# Altium footprint library AudioMoth 1.1.PCBLIB: 193 footprints (part 11 of 13)
Each footprint in its own frame and in the unit in brackets; x right, y up, seen from the top. Pads: shape width x height; smd on the part's side, far side on the other; paste and mask are expansions set on the pad; w line width, h text height; cw(c..) or ccw(c..) is an arc to the next point about the centre after c.
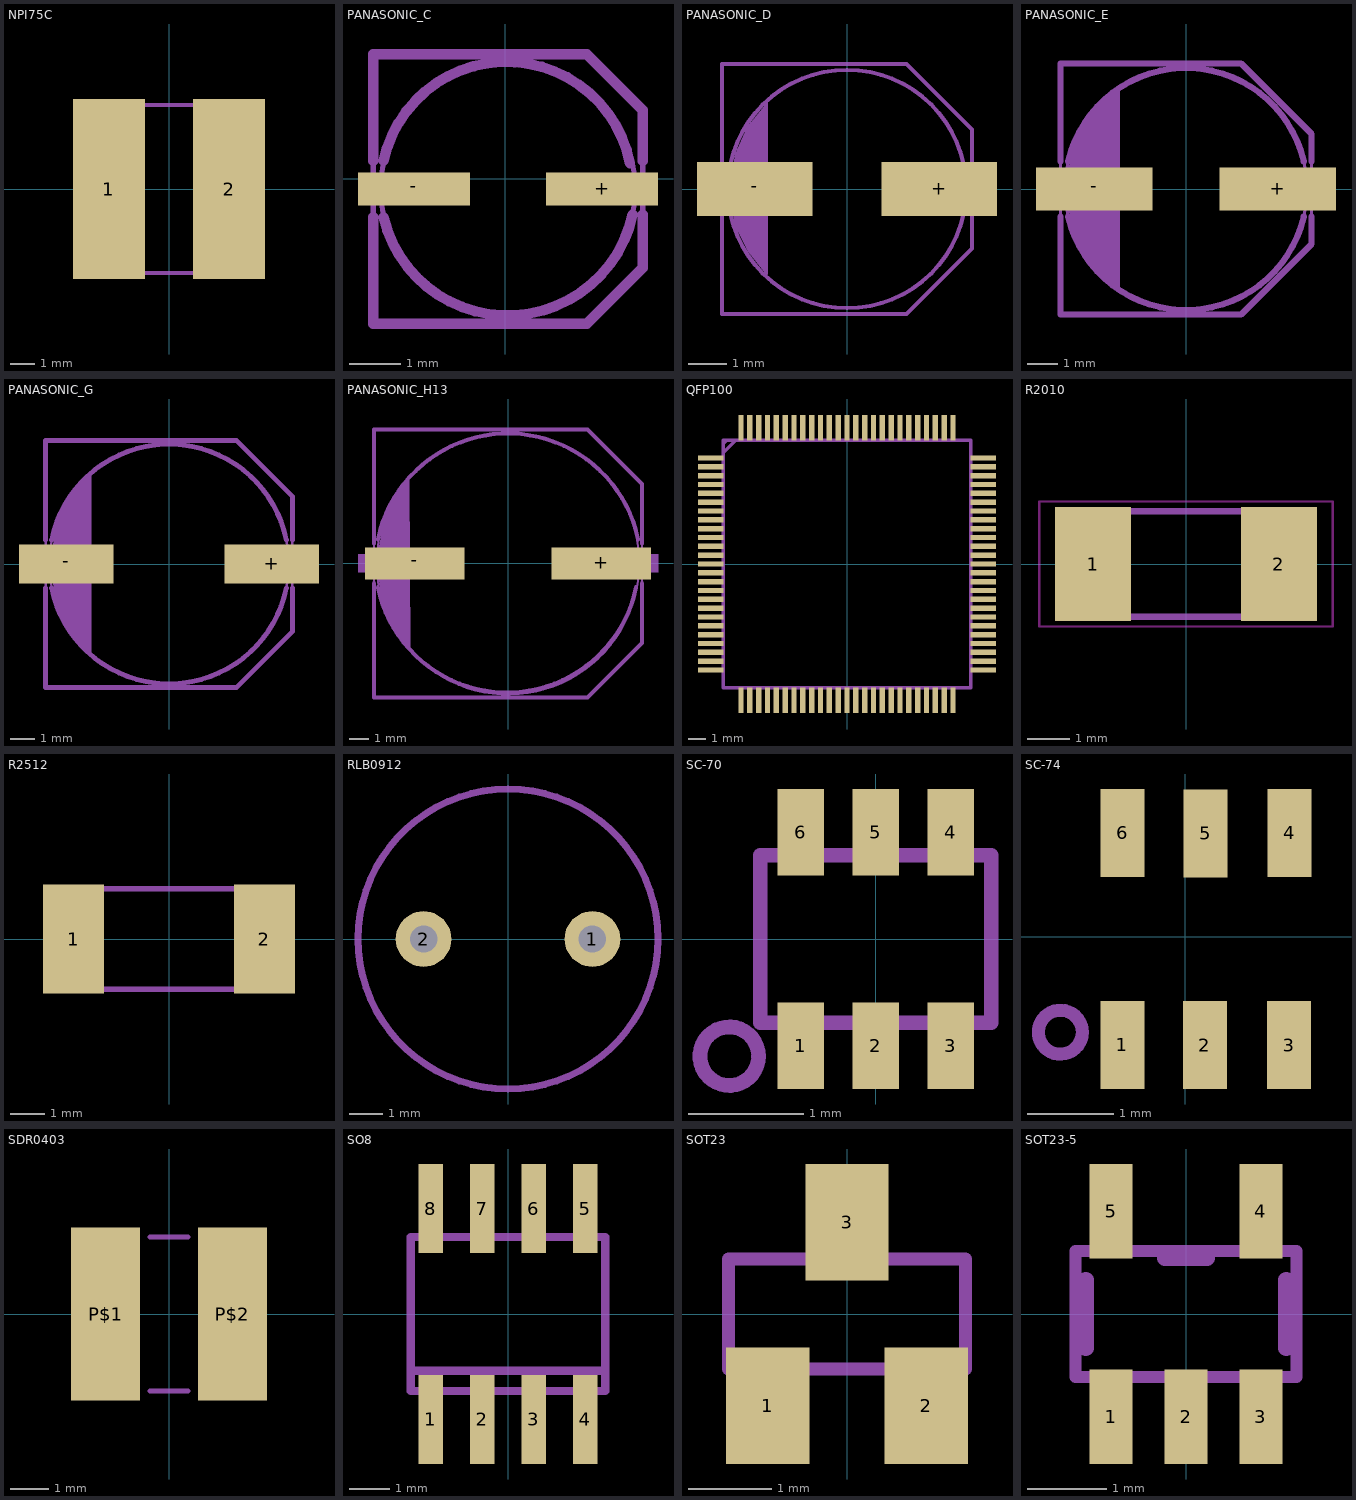
[diagram p10: the footprints below, top view; thin cyan lines are the x and y axes]

## NPI75C [mm]
pads (2):
  rect 3x7.5 smd: 1(-2.5,0) 2(2.5,0)
tDocu:
  lines w0.178: -3.9,-3.5 -3.9,3.5 3.9,3.5 3.9,-3.5 -3.9,-3.5
tPlace:
  lines w0.178: -0.8,-3.5 0.8,-3.5 ; -0.8,3.5 0.8,3.5

## PANASONIC_C [mm]
pads (2):
  rect 2.2x0.65 smd: +(1.9,-0.2) -(-1.8,-0.2)
tDocu:
  circle w0.102: c0.05,-0.2 r2.5
  lines w0.102: -2.6,-2.85 1.6,-2.85 2.7,-1.75 2.7,1.35 1.6,2.45 -2.6,2.45 -2.6,-2.85
tPlace:
  lines w0.203: -2.6,-0.75 -2.6,-2.85 1.6,-2.85 2.7,-1.75 2.7,-0.7 ; -2.6,0.35 -2.6,2.45 1.6,2.45 2.7,1.35 2.7,0.35 ; -2.4,-0.75 ccw(c0.044,-0.175) 2.5,-0.7 ; -2.4,0.35 cw(c0.02,-0.175) 2.45,0.3

## PANASONIC_D [mm]
pads (2):
  rect 3x1.4 smd: +(2.4,0) -(-2.4,0)
tDocu:
  circle w0.102: c0,0 r3.1
  region: -3.65,-0.35 -3.65,0.35 -3.05,0.35 -3.05,-0.35
  region: 3.05,-0.35 3.05,0.35 3.65,0.35 3.65,-0.35
  region: -2.15,2.15 -2.6,1.6 -2.9,0.9 -3.05,0 -2.9,-0.95 -2.55,-1.65 -2.15,-2.15 -2.15,2.1
  lines w0.102: -2.1,-2.2 -2.1,2.25 ; -3.25,-3.25 1.55,-3.25 3.25,-1.55 3.25,1.55 1.55,3.25 -3.25,3.25 -3.25,-3.25
tPlace:
  lines w0.102: -3.25,-0.95 -3.25,-3.25 1.55,-3.25 3.25,-1.55 3.25,-0.95 ; -3.25,0.95 -3.25,3.25 1.55,3.25 3.25,1.55 3.25,0.95 ; -2.95,-0.95 ccw(c0,0) 2.95,-0.95 ; -2.95,0.95 cw(c0,0) 2.95,0.95

## PANASONIC_E [mm]
pads (2):
  rect 3.8x1.4 smd: +(3,0) -(-3,0)
tDocu:
  circle w0.102: c0,0 r3.95
  region: -4.5,-0.35 -4.5,0.35 -3.8,0.35 -3.8,-0.35
  region: 3.8,-0.35 3.8,0.35 4.5,0.35 4.5,-0.35
  region: -2.25,3.2 -3,2.5 -3.6,1.5 -3.85,0.65 -3.85,-0.65 -3.55,-1.6 -2.95,-2.55 -2.25,-3.2 -2.25,3.15
  lines w0.102: -2.2,-3.25 -2.2,3.25 ; -4.1,-4.1 1.8,-4.1 4.1,-1.8 4.1,1.8 1.8,4.1 -4.1,4.1 -4.1,-4.1
tPlace:
  lines w0.203: -4.1,-0.9 -4.1,-4.1 1.8,-4.1 4.1,-1.8 4.1,-0.9 ; -4.1,0.9 -4.1,4.1 1.8,4.1 4.1,1.8 4.1,0.9 ; -3.85,-0.9 ccw(c0,0) 3.85,-0.9 ; -3.85,0.9 cw(c0,0) 3.85,0.9

## PANASONIC_G [mm]
pads (2):
  rect 3.9x1.6 smd: +(4.25,0) -(-4.25,0)
tDocu:
  circle w0.102: c0,0 r4.95
  region: -5.85,-0.45 -5.85,0.45 -4.9,0.45 -4.9,-0.45
  region: 4.9,-0.45 4.9,0.45 5.85,0.45 5.85,-0.45
  region: -3.3,3.6 -4.05,2.75 -4.65,1.55 -4.85,0.45 -4.85,-0.45 -4.65,-1.55 -4.05,-2.75 -3.3,-3.6 -3.3,3.55
  lines w0.102: -3.25,-3.65 -3.25,3.7 ; -5.1,-5.1 2.8,-5.1 5.1,-2.8 5.1,2.8 2.8,5.1 -5.1,5.1 -5.1,-5.1
tPlace:
  lines w0.203: -5.1,-1 -5.1,-5.1 2.8,-5.1 5.1,-2.8 5.1,-1 ; -5.1,1 -5.1,5.1 2.8,5.1 5.1,2.8 5.1,1 ; -4.85,-1 ccw(c0,0) 4.85,-1 ; -4.85,1 cw(c0,0) 4.85,1

## PANASONIC_H13 [mm]
pads (2):
  rect 5x1.6 smd: +(4.7,0) -(-4.7,0)
tDocu:
  circle w0.102: c0,0 r6.6
  region: -7.55,-0.45 -7.55,0.45 -6.6,0.45 -6.6,-0.45
  region: 6.6,-0.45 6.6,0.45 7.55,0.45 7.55,-0.45
  region: -5,4.2 -5.75,3.15 -6.25,2.05 -6.55,0.45 -6.55,-0.45 -6.35,-1.65 -5.75,-3.25 -5,-4.2
  lines w0.102: -5,4.25 -4.95,-4.35 ; -6.75,-6.75 4,-6.75 6.75,-4 6.75,4 4,6.75 -6.75,6.75 -6.75,-6.75
tPlace:
  lines w0.203: -6.75,-1 -6.75,-6.75 4,-6.75 6.75,-4 6.75,-1 ; -6.75,1 -6.75,6.75 4,6.75 6.75,4 6.75,1 ; -6.55,-1.2 ccw(c-0.05,0.141) 6.45,-1.2 ; -6.55,1.2 cw(c0,-0.151) 6.55,1.2

## QFP100 [mm]
pads (100):
  rect 1.45x0.3 smd paste+0 mask+0: 1(-7.7,6) 2(-7.7,5.5) 3(-7.7,5) 4(-7.7,4.5) 5(-7.7,4) 6(-7.7,3.5) 7(-7.7,3) 8(-7.7,2.5) 9(-7.7,2) 10(-7.7,1.5) 11(-7.7,1) 12(-7.7,0.5) 13(-7.7,0) 14(-7.7,-0.5) 15(-7.7,-1) 16(-7.7,-1.5) 17(-7.7,-2) 18(-7.7,-2.5) 19(-7.7,-3) 20(-7.7,-3.5) 21(-7.7,-4) 22(-7.7,-4.5) 23(-7.7,-5) 24(-7.7,-5.5) 25(-7.7,-6) 51(7.7,-6) 52(7.7,-5.5) 53(7.7,-5) 54(7.7,-4.5) 55(7.7,-4) 56(7.7,-3.5) 57(7.7,-3) 58(7.7,-2.5) 59(7.7,-2) 60(7.7,-1.5) 61(7.7,-1) 62(7.7,-0.5) 63(7.7,0) 64(7.7,0.5) 65(7.7,1) 66(7.7,1.5) 67(7.7,2) 68(7.7,2.5) 69(7.7,3) 70(7.7,3.5) 71(7.7,4) 72(7.7,4.5) 73(7.7,5) 74(7.7,5.5) 75(7.7,6)
  rect 0.3x1.45 smd paste+0 mask+0: 26(-6,-7.7) 27(-5.5,-7.7) 28(-5,-7.7) 29(-4.5,-7.7) 30(-4,-7.7) 31(-3.5,-7.7) 32(-3,-7.7) 33(-2.5,-7.7) 34(-2,-7.7) 35(-1.5,-7.7) 36(-1,-7.7) 37(-0.5,-7.7) 38(0,-7.7) 39(0.5,-7.7) 40(1,-7.7) 41(1.5,-7.7) 42(2,-7.7) 43(2.5,-7.7) 44(3,-7.7) 45(3.5,-7.7) 46(4,-7.7) 47(4.5,-7.7) 48(5,-7.7) 49(5.5,-7.7) 50(6,-7.7) 76(6,7.7) 77(5.5,7.7) 78(5,7.7) 79(4.5,7.7) 80(4,7.7) 81(3.5,7.7) 82(3,7.7) 83(2.5,7.7) 84(2,7.7) 85(1.5,7.7) 86(1,7.7) 87(0.5,7.7) 88(0,7.7) 89(-0.5,7.7) 90(-1,7.7) 91(-1.5,7.7) 92(-2,7.7) 93(-2.5,7.7) 94(-3,7.7) 95(-3.5,7.7) 96(-4,7.7) 97(-4.5,7.7) 98(-5,7.7) 99(-5.5,7.7) 100(-6,7.7)
Top Paste:
  drawing of 100 lines, arcs and shapes, not listed
Top Solder:
  drawing of 100 lines, arcs and shapes, not listed
tDocu:
  lines w0.203: -7,6.8 -7,-7 7,-7 7,7 -6.8,7 ; -7,6.8 -7,7 -6.8,7 ; -7,6.8 -6.8,7
tPlace:
  lines w0.203: -7,-6.301 -7,-7 -6.301,-7 ; 6.301,-7 7,-7 7,-6.301 ; 6.301,7 7,7 7,6.301 ; -7,6.301 -7,7 -6.301,7 -7,6.301

## R2010 [mm]
pads (2):
  rect 1.8x2.7 smd: 1(-2.2,0) 2(2.2,0)
Top keep-out:
  lines w0.051: -3.473,-1.483 3.473,-1.483 3.473,1.483 -3.473,1.483 -3.473,-1.483
tDocu:
  region: -2.489,-1.321 -2.489,1.329 -1.639,1.329 -1.639,-1.321
  region: 1.651,-1.321 1.651,1.329 2.501,1.329 2.501,-1.321
  lines w0.152: -1.662,1.245 1.662,1.245 ; -1.637,-1.245 1.687,-1.245
tPlace:
  lines w0.152: -1.027,1.245 1.027,1.245 ; -1.002,-1.245 1.016,-1.245

## R2512 [mm]
pads (2):
  rect 1.8x3.2 smd: 1(-2.8,0) 2(2.8,0)
tDocu:
  region: -3.2,-1.549 -3.2,1.551 -2.351,1.551 -2.351,-1.549
  region: 2.362,-1.549 2.362,1.551 3.212,1.551 3.212,-1.549
  lines w0.152: -2.362,-1.473 2.387,-1.473 ; -2.362,1.473 2.387,1.473

## RLB0912 [mil]
pads (2):
  round 65 hole 32: 1(98.5,0) 2(-98.5,0)
tPlace:
  circle w8: c0,0 r175

## SC-70 [mm]
pads (6):
  rect 0.4x0.75 smd paste+0: 1(-0.65,-0.925) 2(0,-0.925) 3(0.65,-0.925) 4(0.65,0.925) 5(0,0.925) 6(-0.65,0.925)
Top Paste:
  region: -0.85,0.55 -0.85,1.3 -0.45,1.3 -0.45,0.55
  region: 0.45,0.55 0.45,1.3 0.85,1.3 0.85,0.55
  region: -0.85,-1.3 -0.85,-0.55 -0.45,-0.55 -0.45,-1.3
  region: -0.2,0.55 -0.2,1.3 0.2,1.3 0.2,0.55
  region: -0.85,-1.3 -0.85,-0.55 -0.45,-0.55 -0.45,-1.3
  region: -0.85,-1.3 -0.85,-0.55 -0.45,-0.55 -0.45,-1.3
  region: -0.201,-1.3 -0.201,-0.55 0.199,-0.55 0.199,-1.3
  region: 0.45,-1.3 0.45,-0.55 0.85,-0.55 0.85,-1.3
tDocu:
  lines w0.127: -1,-0.725 -1,0.725 1,0.725 1,-0.725 -1,-0.725
tPlace:
  circle w0.127: c-1.27,-1.016 r0.254

## SC-74 [mil]
pads (6):
  rect 20x40 smd: 1(-28.62,-49.13) 2(8.86,-49.21) 3(47.24,-49.21) 4(47.44,47.24) 5(9.25,47.05) 6(-28.54,47.24)
tPlace:
  circle w5.91: c-56.85,-43.39 r10

## SDR0403 [mm]
pads (2):
  rect 1.8x4.5 smd: P$1(-1.65,0) P$2(1.65,0)
tPlace:
  lines w0.127: -0.5,-2 0.5,-2 ; -0.5,2 0.5,2

## SO8 [mm]
pads (8):
  rect 0.6x2.2 smd: 1(-1.905,-2.6) 2(-0.635,-2.6) 3(0.635,-2.6) 4(1.905,-2.6) 5(1.905,2.6) 6(0.635,2.6) 7(-0.635,2.6) 8(-1.905,2.6)
tDocu:
  region: -2.15,-3.1 -2.15,-2 -1.66,-2 -1.66,-3.1
  region: -0.88,-3.1 -0.88,-2 -0.39,-2 -0.39,-3.1
  region: 0.39,-3.1 0.39,-2 0.88,-2 0.88,-3.1
  region: 1.66,-3.1 1.66,-2 2.15,-2 2.15,-3.1
  region: 1.66,2 1.66,3.1 2.15,3.1 2.15,2
  region: 0.39,2 0.39,3.1 0.88,3.1 0.88,2
  region: -0.88,2 -0.88,3.1 -0.39,3.1 -0.39,2
  region: -2.15,2 -2.15,3.1 -1.66,3.1 -1.66,2
  lines w0.203: -2.4,-1.4 -2.4,-1.9 2.4,-1.9 2.4,-1.4 ; -2.4,-1.4 -2.4,1.9 2.4,1.9 2.4,-1.4 ; -2.4,-1.4 2.4,-1.4

## SOT23 [mm]
pads (3):
  rect 1x1.4 smd: 1(-0.95,-1.1) 2(0.95,-1.1) 3(0,1.1)
tDocu:
  region: -0.229,0.711 -0.229,1.295 0.229,1.295 0.229,0.711
  region: 0.711,-1.295 0.711,-0.711 1.168,-0.711 1.168,-1.295
  region: -1.168,-1.295 -1.168,-0.711 -0.711,-0.711 -0.711,-1.295
  lines w0.152: -1.422,-0.66 1.422,-0.66 1.422,0.66 -1.422,0.66 -1.422,-0.66

## SOT23-5 [mm]
pads (5):
  rect 0.55x1.2 smd: 1(-0.95,-1.3) 2(0,-1.3) 3(0.95,-1.3) 4(0.95,1.3) 5(-0.95,1.3)
tDocu:
  region: -1.2,-1.5 -1.2,-0.85 -0.7,-0.85 -0.7,-1.5
  region: -0.25,-1.5 -0.25,-0.85 0.25,-0.85 0.25,-1.5
  region: 0.7,-1.5 0.7,-0.85 1.2,-0.85 1.2,-1.5
  region: 0.7,0.85 0.7,1.5 1.2,1.5 1.2,0.85
  region: -1.2,0.85 -1.2,1.5 -0.7,1.5 -0.7,0.85
  lines w0.152: -1.4,-0.8 1.4,-0.8 1.4,0.8 -1.4,0.8 -1.4,-0.8
tPlace:
  lines w0.203: -1.27,-0.43 -1.27,0.43 ; -0.268,0.709 0.268,0.709 ; 1.27,-0.43 1.27,0.43